# Altium schematic symbol library slots.SchLib: 1 symbol
Pins are listed as number, name and electrical type; pins without a type are passive.

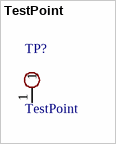
[diagram p0: symbol TestPoint]

## TestPoint
designator TP?
footprint TestPoint_Pad_D1mm
pins: 1